# Altium footprint library BaseStation.PcbLib: 68 footprints (part 2 of 5)
Each footprint in its own frame and in the unit in brackets; x right, y up, seen from the top. Pads: shape width x height; smd on the part's side, far side on the other; paste and mask are expansions set on the pad; w line width, h text height; cw(c..) or ccw(c..) is an arc to the next point about the centre after c.
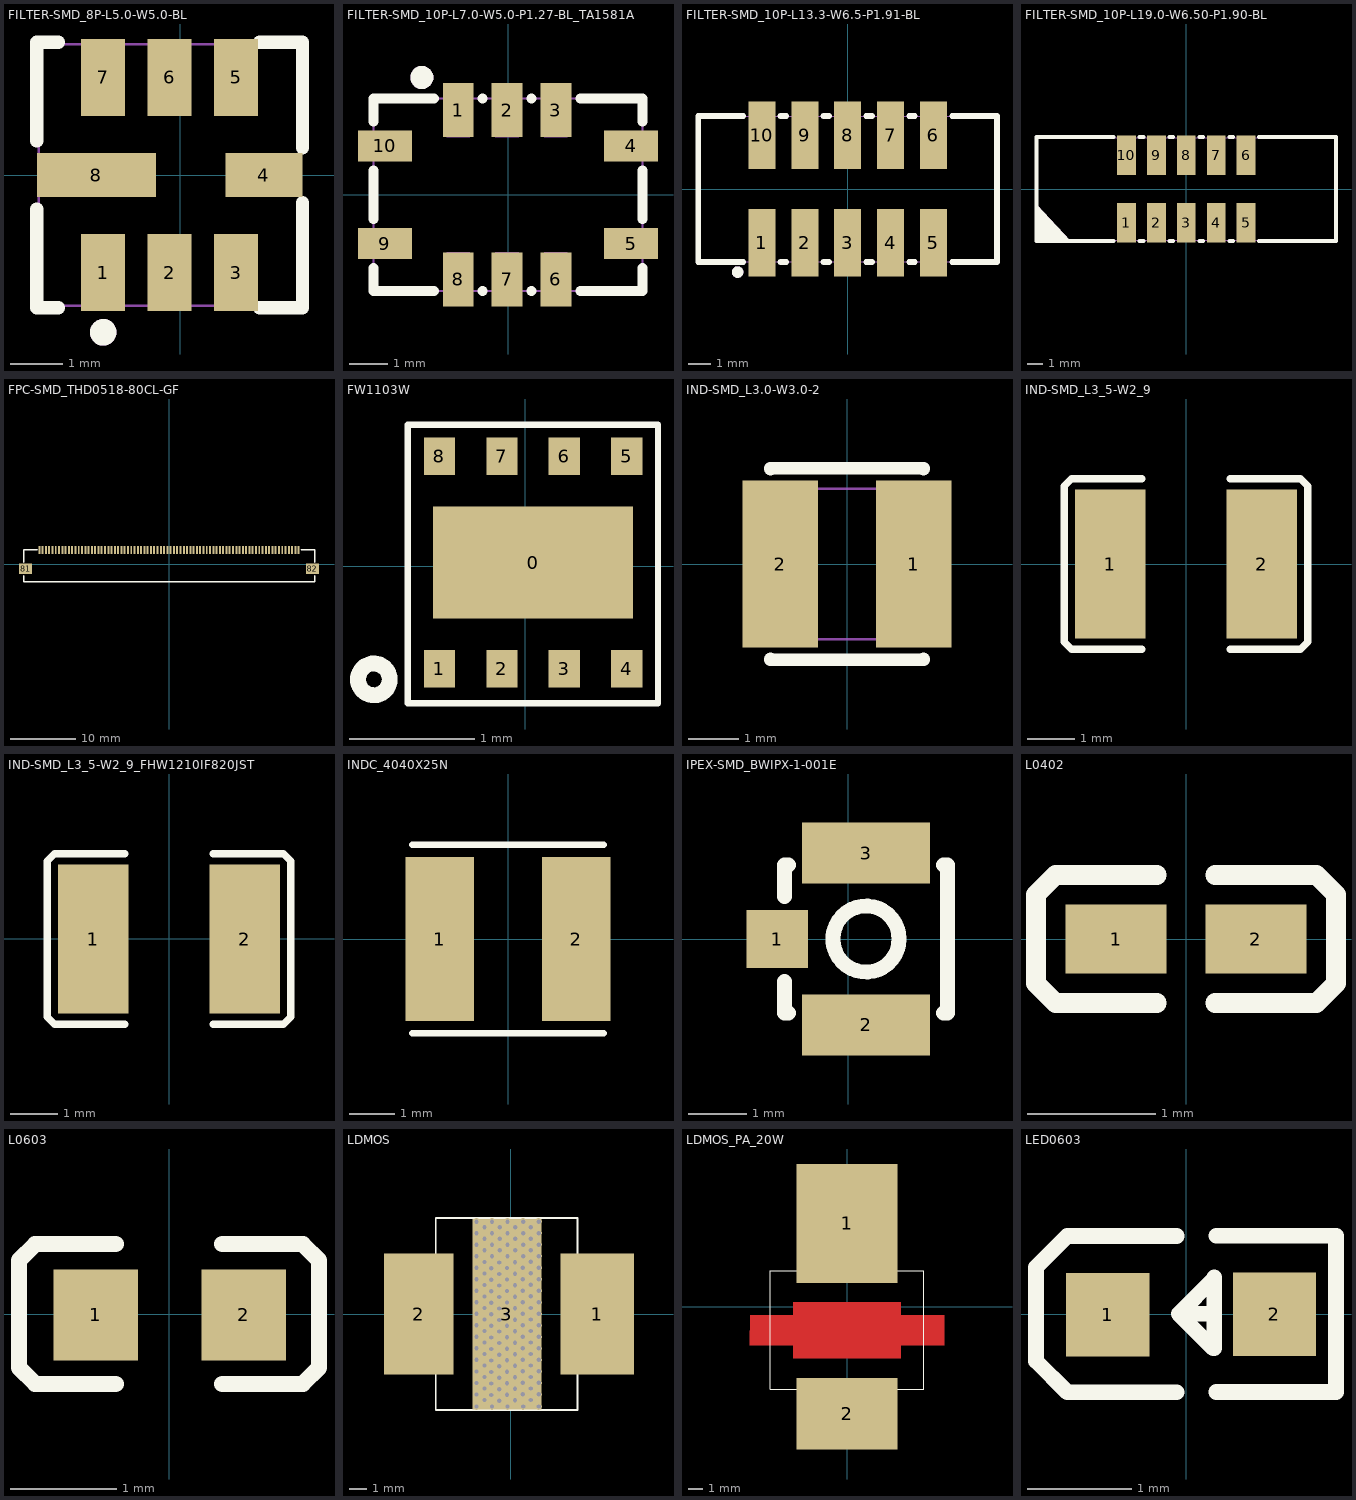
[diagram p1: the footprints below, top view; thin cyan lines are the x and y axes]

## FILTER-SMD_8P-L5.0-W5.0-BL [mm]
pads (8):
  rect 0.84x1.47 smd: 1(-1.47,-1.865) 2(-0.2,-1.865) 3(1.07,-1.865) 5(1.07,1.865) 6(-0.2,1.865) 7(-1.47,1.865)
  rect 1.47x0.84 smd: 4(1.6,0)
  rect 2.28x0.84 smd: 8(-1.6,0)
Top Overlay:
  circle w0.254: c-1.47,-3.008 r0.127
  lines w0.254: -2.743,-0.651 -2.743,-2.54 -2.324,-2.54 ; -2.743,0.651 -2.743,2.54 -2.324,2.54 ; 1.519,-2.54 2.337,-2.54 2.337,-0.524 ; 1.519,2.54 2.337,2.54 2.337,0.524
Mechanical 2:
  circle w0.254: c-1.47,-3.008 r0.127
Mechanical 6:
  lines w0.051: -2.703,-2.5 2.297,-2.5 2.297,2.5 -2.703,2.5 -2.703,-2.5
Mechanical 8:
  region: -2.643,-2.525 -2.678,-2.56 -2.727,-2.56 -2.763,-2.525 -2.763,-2.475 -2.727,-2.44 -2.678,-2.44 -2.643,-2.475
Mechanical 9:
  region: -2.703,0.32 -0.623,0.32 -0.623,-0.32 -2.703,-0.32
  region: -1.79,-1.33 -1.15,-1.33 -1.15,-2.5 -1.79,-2.5
  region: -0.52,-1.33 0.12,-1.33 0.12,-2.5 -0.52,-2.5
  region: 0.75,-1.33 1.39,-1.33 1.39,-2.5 0.75,-2.5
  region: 1.127,0.32 2.297,0.32 2.297,-0.32 1.127,-0.32
  region: 0.75,2.5 1.39,2.5 1.39,1.33 0.75,1.33
  region: -0.52,2.5 0.12,2.5 0.12,1.33 -0.52,1.33
  region: -1.79,2.5 -1.15,2.5 -1.15,1.33 -1.79,1.33

## FILTER-SMD_10P-L7.0-W5.0-P1.27-BL_TA1581A [mm]
pads (10):
  rect 0.8x1.4 smd paste+0 mask+0.05: 1(-1.295,2.2) 2(-0.025,2.2) 3(1.245,2.2) 6(1.245,-2.2) 7(-0.025,-2.2) 8(-1.295,-2.2)
  rect 1.4x0.8 smd paste+0 mask+0.05: 4(3.2,1.27) 5(3.2,-1.27) 9(-3.2,-1.27) 10(-3.2,1.27)
Top Overlay:
  circle w0.3: c-2.24,3.05 r0.15
  lines w0.254: -3.5,-1.901 -3.5,-2.5 -1.926,-2.5 ; -3.5,-0.639 -3.5,0.639 ; -3.5,1.901 -3.5,2.5 -1.926,2.5 ; -0.664,-2.5 -0.656,-2.5 ; -0.664,2.5 -0.656,2.5 ; 0.606,-2.5 0.614,-2.5 ; 0.606,2.5 0.614,2.5 ; 1.876,-2.5 3.5,-2.5 3.5,-1.901 ; 1.876,2.5 3.5,2.5 3.5,1.901 ; 3.5,-0.639 3.5,0.639
Mechanical 2:
  circle w0.3: c-2.24,3.05 r0.15
Mechanical 6:
  lines w0.051: -3.5,-2.5 -3.5,2.5 3.5,2.5 3.5,-2.5 -3.5,-2.5
Mechanical 8:
  region: -3.44,2.475 -3.475,2.44 -3.525,2.44 -3.56,2.475 -3.56,2.525 -3.525,2.56 -3.475,2.56 -3.44,2.525
Mechanical 9:
  region: -3.5,1.57 -2.5,1.57 -2.5,0.97 -3.5,0.97
  region: -3.5,-0.97 -2.5,-0.97 -2.5,-1.57 -3.5,-1.57
  region: -1.595,-2.5 -1.595,-1.5 -0.995,-1.5 -0.995,-2.5
  region: -0.325,-2.5 -0.325,-1.5 0.275,-1.5 0.275,-2.5
  region: 0.945,-2.5 0.945,-1.5 1.545,-1.5 1.545,-2.5
  region: 3.5,-1.57 2.5,-1.57 2.5,-0.97 3.5,-0.97
  region: 3.5,0.97 2.5,0.97 2.5,1.57 3.5,1.57
  region: 1.545,2.5 1.545,1.5 0.945,1.5 0.945,2.5
  region: 0.275,2.5 0.275,1.5 -0.325,1.5 -0.325,2.5
  region: -0.995,2.5 -0.995,1.5 -1.595,1.5 -1.595,2.5

## FILTER-SMD_10P-L13.3-W6.5-P1.91-BL [mm]
pads (10):
  rect 1.2x3 smd paste+0 mask+0.05: 1(-3.82,-2.4) 2(-1.91,-2.4) 3(0,-2.4) 4(1.91,-2.4) 5(3.82,-2.4) 6(3.82,2.4) 7(1.91,2.4) 8(0,2.4) 9(-1.91,2.4) 10(-3.82,2.4)
Top Overlay:
  circle w0.254: c-4.9,-3.7 r0.127
  lines w0.254: -4.651,-3.25 -6.65,-3.25 -6.65,3.25 -4.651,3.25 ; -2.989,-3.25 -2.741,-3.25 ; -2.989,3.25 -2.741,3.25 ; -1.079,-3.25 -0.831,-3.25 ; -1.079,3.25 -0.831,3.25 ; 0.831,-3.25 1.079,-3.25 ; 0.831,3.25 1.079,3.25 ; 2.741,-3.25 2.989,-3.25 ; 2.741,3.25 2.989,3.25 ; 4.651,-3.25 6.65,-3.25 6.65,3.25 4.651,3.25
Mechanical 2:
  circle w0.254: c-4.9,-3.7 r0.127
Mechanical 6:
  lines w0.051: -6.65,-3.25 6.65,-3.25 6.65,3.25 -6.65,3.25 -6.65,-3.25
Mechanical 8:
  region: -6.59,-3.275 -6.625,-3.31 -6.675,-3.31 -6.71,-3.275 -6.71,-3.225 -6.675,-3.19 -6.625,-3.19 -6.59,-3.225
Mechanical 9:
  region: -4.33,-1.02 -3.31,-1.02 -3.31,-3.25 -4.33,-3.25
  region: -2.42,-1.02 -1.4,-1.02 -1.4,-3.25 -2.42,-3.25
  region: -0.51,-1.02 0.51,-1.02 0.51,-3.25 -0.51,-3.25
  region: 1.4,-1.02 2.42,-1.02 2.42,-3.25 1.4,-3.25
  region: 3.31,-1.02 4.33,-1.02 4.33,-3.25 3.31,-3.25
  region: 3.31,3.25 4.33,3.25 4.33,1.02 3.31,1.02
  region: 1.4,3.25 2.42,3.25 2.42,1.02 1.4,1.02
  region: -0.51,3.25 0.51,3.25 0.51,1.02 -0.51,1.02
  region: -2.42,3.25 -1.4,3.25 -1.4,1.02 -2.42,1.02
  region: -4.33,3.25 -3.31,3.25 -3.31,1.02 -4.33,1.02

## FILTER-SMD_10P-L19.0-W6.50-P1.90-BL [mm]
pads (10):
  rect 1.2x2.5 smd paste+0 mask+0.05: 1(-3.81,-2.15) 2(-1.905,-2.15) 3(0,-2.15) 4(1.905,-2.15) 5(3.81,-2.15) 6(3.81,2.15) 7(1.905,2.15) 8(0,2.15) 9(-1.905,2.15) 10(-3.81,2.15)
Top Overlay:
  region: -9.525,-1.016 -9.525,-3.302 -7.366,-3.302
  lines w0.254: -4.641,-3.302 -9.525,-3.302 -9.525,3.302 -4.641,3.302 ; -2.979,-3.302 -2.736,-3.302 ; -2.979,3.302 -2.736,3.302 ; -1.074,-3.302 -0.831,-3.302 ; -1.074,3.302 -0.831,3.302 ; 0.831,-3.302 1.074,-3.302 ; 0.831,3.302 1.074,3.302 ; 2.736,-3.302 2.979,-3.302 ; 2.736,3.302 2.979,3.302 ; 4.641,-3.302 9.525,-3.302 9.525,3.302 4.641,3.302 4.699,3.302
Mechanical 2:
  region: -9.525,-1.016 -9.525,-3.302 -7.366,-3.302
Mechanical 6:
  lines w0.051: -9.5,-3.25 9.5,-3.25 9.5,3.25 -9.5,3.25 -9.5,-3.25
Mechanical 8:
  region: -9.44,-3.275 -9.475,-3.31 -9.525,-3.31 -9.56,-3.275 -9.56,-3.225 -9.525,-3.19 -9.475,-3.19 -9.44,-3.225
Mechanical 9:
  region: -4.32,-0.964 -3.3,-0.964 -3.3,-3.25 -4.32,-3.25
  region: -2.415,-0.964 -1.395,-0.964 -1.395,-3.25 -2.415,-3.25
  region: -0.51,-0.964 0.51,-0.964 0.51,-3.25 -0.51,-3.25
  region: 1.395,-0.964 2.415,-0.964 2.415,-3.25 1.395,-3.25
  region: 3.3,-0.964 4.32,-0.964 4.32,-3.25 3.3,-3.25
  region: 3.3,3.25 4.32,3.25 4.32,0.964 3.3,0.964
  region: 1.395,3.25 2.415,3.25 2.415,0.964 1.395,0.964
  region: -0.51,3.25 0.51,3.25 0.51,0.964 -0.51,0.964
  region: -2.415,3.25 -1.395,3.25 -1.395,0.964 -2.415,0.964
  region: -4.32,3.25 -3.3,3.25 -3.3,0.964 -4.32,0.964

## FPC-SMD_THD0518-80CL-GF [mm] "FPC-SMD_THD0518-80CL-GF"
pads (82):
  rect 0.3x1.2 smd: 1(-19.75,2.143) 2(-19.251,2.143) 3(-18.751,2.143) 4(-18.25,2.143) 5(-17.75,2.143) 6(-17.249,2.143) 7(-16.749,2.143) 8(-16.25,2.143) 9(-15.751,2.143) 10(-15.25,2.143) 11(-14.75,2.143) 12(-14.25,2.143) 13(-13.749,2.143) 14(-13.25,2.143) 15(-12.75,2.143) 16(-12.251,2.143) 17(-11.75,2.143) 18(-11.25,2.143) 19(-10.75,2.143) 20(-10.249,2.143) 21(-9.749,2.143) 22(-9.251,2.143) 23(-8.751,2.143) 24(-8.25,2.143) 25(-7.75,2.143) 26(-7.249,2.143) 27(-6.749,2.143) 28(-6.25,2.143) 29(-5.751,2.143) 30(-5.25,2.143) 31(-4.75,2.143) 32(-4.25,2.143) 33(-3.749,2.143) 34(-3.249,2.143) 35(-2.749,2.143) 36(-2.251,2.143) 37(-1.75,2.143) 38(-1.25,2.143) 39(-0.75,2.143) 40(-0.249,2.143) 41(0.251,2.143) 42(0.749,2.143) 43(1.249,2.143) 44(1.75,2.143) 45(2.25,2.143) 46(2.751,2.143) 47(3.251,2.143) 48(3.75,2.143) 49(4.249,2.143) 50(4.75,2.143) 51(5.25,2.143) 52(5.75,2.143) 53(6.251,2.143) 54(6.751,2.143) 55(7.25,2.143) 56(7.749,2.143) 57(8.25,2.143) 58(8.75,2.143) 59(9.25,2.143) 60(9.751,2.143) 61(10.25,2.143) 62(10.75,2.143) 63(11.25,2.143) 64(11.75,2.143) 65(12.25,2.143) 66(12.75,2.143) 67(13.25,2.143) 68(13.75,2.143) 69(14.25,2.143) 70(14.75,2.143) 71(15.25,2.143) 72(15.75,2.143) 73(16.25,2.143) 74(16.75,2.143) 75(17.25,2.143) 76(17.75,2.143) 77(18.25,2.143) 78(18.75,2.143) 79(19.25,2.143) 80(19.75,2.143)
  rect 2x1.6 smd: 81(-21.85,-0.697) 82(21.85,-0.697)
Top Overlay:
  lines w0.254: -22.15,-1.728 -22.15,-2.667 22.19,-2.667 22.19,-1.728 ; -22.15,0.334 -22.15,2.223 -20.11,2.223 ; 20.131,2.223 22.19,2.223 22.19,2.173 22.19,0.334

## FW1103W [mm] "FW1103W"
pads (9):
  rect 1.6x0.9 smd: 0(0.065,0.03)
  rect 0.25x0.3 smd: 1(-0.685,-0.82) 2(-0.185,-0.82) 3(0.315,-0.82) 4(0.815,-0.82) 5(0.815,0.88) 6(0.315,0.881) 7(-0.185,0.88) 8(-0.685,0.88)
Top Overlay:
  circle w0.127: c-1.211,-0.905 r0.127
  lines w0.05: -0.94,0.998 -0.939,0.999 -0.939,1.134 1.065,1.134 1.065,-1.091 ; -0.938,0.986 -0.938,-1.097 -0.435,-1.097 0.565,-1.097 1.065,-1.097

## IND-SMD_L3.0-W3.0-2 [mm]
pads (2):
  rect 1.5x3.32 smd: 1(1.328,0) 2(-1.328,0)
Top Overlay:
  lines w0.254: -1.524,-1.891 -1.524,-1.905 1.524,-1.905 1.524,-1.891 ; -1.524,1.891 -1.524,1.905 1.524,1.905 1.524,1.891
Mechanical 15:
  region: 1.584,-1.524 1.584,-1.549 1.549,-1.584 1.499,-1.584 1.464,-1.549 1.464,-1.524 1.464,-1.499 1.499,-1.464 1.549,-1.464 1.584,-1.499
  region: -1.5,-1.45 -1.5,1.45 -0.75,1.45 -0.75,-1.45
  region: 1.5,-1.45 1.5,1.45 0.75,1.45 0.75,-1.45
  lines w0.051: -1.5,-1.5 -1.5,1.5 1.5,1.5 1.5,-1.5 -1.5,-1.5

## IND-SMD_L3_5-W2_9 [mm] "IND-SMD_L3_5-W2_9"
pads (2):
  rect 1.485x3.132 smd: 1(-1.593,0) 2(1.593,0)
Top Overlay:
  lines w0.152: -0.926,-1.795 -2.411,-1.795 -2.564,-1.642 -2.564,1.642 -2.411,1.795 -0.926,1.795 ; 0.926,-1.795 2.411,-1.795 2.564,-1.642 2.564,1.642 2.411,1.795 0.926,1.795

## IND-SMD_L3_5-W2_9_FHW1210IF820JST [mm] "IND-SMD_L3_5-W2_9_FHW1210IF820JST"
pads (2):
  rect 1.485x3.132 smd: 1(-1.593,0) 2(1.593,0)
Top Overlay:
  lines w0.152: -0.926,-1.795 -2.411,-1.795 -2.564,-1.642 -2.564,1.642 -2.411,1.795 -0.926,1.795 ; 0.926,-1.795 2.411,-1.795 2.564,-1.642 2.564,1.642 2.411,1.795 0.926,1.795

## INDC_4040X25N [mm] "INDC_4040X25N"
pads (2):
  rect 1.5x3.6 smd: 1(-1.5,0) 2(1.5,0)
Top Overlay:
  lines w0.15: -2.1,-2.075 2.1,-2.075 ; -2.1,2.075 2.1,2.075

## IPEX-SMD_BWIPX-1-001E [mm] "IPEX-SMD_BWIPX-1-001E"
pads (3):
  rect 1.05x1 smd: 1(-1.224,0)
  rect 2.2x1.05 smd: 2(0.301,-1.475) 3(0.301,1.475)
Top Overlay:
  circle w0.254: c0.301,0 r0.568
  lines w0.254: -1.097,-0.731 -1.097,-1.27 -1.031,-1.27 ; -1.097,0.731 -1.097,1.27 -1.031,1.27 ; 1.632,-1.27 1.698,-1.27 1.698,-0.731 1.698,0.731 1.698,1.27 1.632,1.27

## L0402 [mm] "L0402"
pads (2):
  rect 0.79x0.54 smd: 1(-0.545,0) 2(0.545,0)
Top Overlay:
  lines w0.152: -0.226,-0.499 -1.016,-0.499 -1.169,-0.346 -1.169,0.346 -1.016,0.499 -0.226,0.499 ; 0.226,-0.499 1.016,-0.499 1.169,-0.346 1.169,0.346 1.016,0.499 0.226,0.499

## L0603 [mil] "L0603"
pads (2):
  rect 31.5x34.02 smd: 1(-27.29,-0.36) 2(27.82,-0.36)
Top Overlay:
  lines w5.98: -49.8,-26 -19.8,-26 ; -49.8,26.01 -19.8,26.01 ; 19.8,-26 49.8,-26 ; 19.8,26.01 49.8,26.01
  lines w6: -49.8,-26 -55.8,-20.01 -55.8,20.01 -49.8,26.01 ; 49.8,-26 55.8,-20.01 55.8,20.01 49.8,26.01

## LDMOS [mm]
pads (3):
  rect 4.25x7 smd mask+0: 1(4.994,0.007)
  rect 4x7 smd mask+0: 2(-5.328,0.007)
  rect 4x11 smd mask+0: 3(-0.228,0.007)
via 1.601,4.679 diameter 0.4 hole 0.25
via 1.601,4.014 diameter 0.4 hole 0.25
via 1.601,2.682 diameter 0.4 hole 0.25
via 1.601,2.017 diameter 0.4 hole 0.25
via 1.601,1.353 diameter 0.4 hole 0.25
via 1.601,0.688 diameter 0.4 hole 0.25
via 1.601,0.024 diameter 0.4 hole 0.25
via 1.601,-0.641 diameter 0.4 hole 0.25
via 1.601,-1.305 diameter 0.4 hole 0.25
via 1.601,-1.97 diameter 0.4 hole 0.25
via 1.601,-2.634 diameter 0.4 hole 0.25
via 1.601,-3.299 diameter 0.4 hole 0.25
via 1.601,-3.963 diameter 0.4 hole 0.25
via 1.601,-4.628 diameter 0.4 hole 0.25
via 1.138,3.021 diameter 0.4 hole 0.25
via 1.138,2.357 diameter 0.4 hole 0.25
via 1.138,1.692 diameter 0.4 hole 0.25
via 1.138,1.028 diameter 0.4 hole 0.25
via 1.138,0.363 diameter 0.4 hole 0.25
via 1.138,-0.301 diameter 0.4 hole 0.25
via 1.138,-0.966 diameter 0.4 hole 0.25
via 1.138,-1.63 diameter 0.4 hole 0.25
via 1.138,-2.295 diameter 0.4 hole 0.25
via 1.138,-2.959 diameter 0.4 hole 0.25
via 1.138,-3.624 diameter 0.4 hole 0.25
via 1.138,-4.288 diameter 0.4 hole 0.25
via 1.138,-4.953 diameter 0.4 hole 0.25
via 0.705,4.679 diameter 0.4 hole 0.25
via 0.705,4.014 diameter 0.4 hole 0.25
via 0.705,3.35 diameter 0.4 hole 0.25
via 0.676,2.685 diameter 0.4 hole 0.25
via 0.676,2.02 diameter 0.4 hole 0.25
via 0.676,1.355 diameter 0.4 hole 0.25
via 0.676,0.691 diameter 0.4 hole 0.25
via 0.676,0.026 diameter 0.4 hole 0.25
via 0.676,-0.639 diameter 0.4 hole 0.25
via 0.676,-1.304 diameter 0.4 hole 0.25
via 0.676,-1.968 diameter 0.4 hole 0.25
via 0.676,-2.633 diameter 0.4 hole 0.25
via 0.676,-3.298 diameter 0.4 hole 0.25
via 0.676,-3.963 diameter 0.4 hole 0.25
via 0.676,-4.628 diameter 0.4 hole 0.25
via 0.705,5.344 diameter 0.4 hole 0.25
via 1.601,5.344 diameter 0.4 hole 0.25
via 0.233,3.003 diameter 0.4 hole 0.25
via 0.233,2.338 diameter 0.4 hole 0.25
via 0.233,1.674 diameter 0.4 hole 0.25
via 0.233,1.009 diameter 0.4 hole 0.25
via 0.233,0.345 diameter 0.4 hole 0.25
via 0.233,-0.32 diameter 0.4 hole 0.25
via 0.233,-0.984 diameter 0.4 hole 0.25
via 0.233,-1.649 diameter 0.4 hole 0.25
via 0.233,-2.313 diameter 0.4 hole 0.25
via 0.233,-2.978 diameter 0.4 hole 0.25
via 0.233,-3.642 diameter 0.4 hole 0.25
via 0.233,-4.307 diameter 0.4 hole 0.25
via 0.233,-4.971 diameter 0.4 hole 0.25
via -0.192,4.679 diameter 0.4 hole 0.25
via -0.192,4.014 diameter 0.4 hole 0.25
via -0.228,2.666 diameter 0.4 hole 0.25
via -0.228,2.001 diameter 0.4 hole 0.25
via -0.228,1.336 diameter 0.4 hole 0.25
via -0.228,0.672 diameter 0.4 hole 0.25
via -0.228,0.007 diameter 0.4 hole 0.25
via -0.228,-0.658 diameter 0.4 hole 0.25
via -0.228,-1.323 diameter 0.4 hole 0.25
via -0.228,-1.987 diameter 0.4 hole 0.25
via -0.228,-2.652 diameter 0.4 hole 0.25
via -0.228,-3.317 diameter 0.4 hole 0.25
via -0.228,-3.982 diameter 0.4 hole 0.25
via -0.228,-4.646 diameter 0.4 hole 0.25
via -0.192,5.344 diameter 0.4 hole 0.25
via -0.636,4.35 diameter 0.4 hole 0.25
via -0.674,2.985 diameter 0.4 hole 0.25
via -0.674,2.32 diameter 0.4 hole 0.25
via -0.674,1.656 diameter 0.4 hole 0.25
via -0.674,0.991 diameter 0.4 hole 0.25
via -0.674,0.327 diameter 0.4 hole 0.25
via -0.674,-0.338 diameter 0.4 hole 0.25
via -0.674,-1.002 diameter 0.4 hole 0.25
via -0.674,-1.667 diameter 0.4 hole 0.25
via -0.674,-2.331 diameter 0.4 hole 0.25
via -0.674,-2.996 diameter 0.4 hole 0.25
via -0.674,-3.66 diameter 0.4 hole 0.25
via -0.674,-4.325 diameter 0.4 hole 0.25
via -0.674,-4.989 diameter 0.4 hole 0.25
via -1.088,4.679 diameter 0.4 hole 0.25
via -1.088,4.014 diameter 0.4 hole 0.25
via -1.136,2.648 diameter 0.4 hole 0.25
via -1.136,1.983 diameter 0.4 hole 0.25
via -1.136,1.319 diameter 0.4 hole 0.25
via -1.136,0.654 diameter 0.4 hole 0.25
via -1.136,-0.011 diameter 0.4 hole 0.25
via -1.136,-0.676 diameter 0.4 hole 0.25
via -1.136,-1.34 diameter 0.4 hole 0.25
via -1.136,-2.005 diameter 0.4 hole 0.25
via -1.136,-2.67 diameter 0.4 hole 0.25
via -1.136,-3.335 diameter 0.4 hole 0.25
via -1.136,-4 diameter 0.4 hole 0.25
via -1.136,-4.664 diameter 0.4 hole 0.25
via -1.088,5.344 diameter 0.4 hole 0.25
via -1.523,3.016 diameter 0.4 hole 0.25
via -1.523,2.351 diameter 0.4 hole 0.25
via -1.523,1.687 diameter 0.4 hole 0.25
via -1.523,1.022 diameter 0.4 hole 0.25
via -1.523,0.358 diameter 0.4 hole 0.25
via -1.523,-0.307 diameter 0.4 hole 0.25
via -1.523,-0.971 diameter 0.4 hole 0.25
via -1.523,-1.636 diameter 0.4 hole 0.25
via -1.523,-2.3 diameter 0.4 hole 0.25
via -1.523,-2.965 diameter 0.4 hole 0.25
via -1.523,-3.629 diameter 0.4 hole 0.25
via -1.523,-4.294 diameter 0.4 hole 0.25
via -1.523,-4.958 diameter 0.4 hole 0.25
via -1.985,4.679 diameter 0.4 hole 0.25
via -1.985,4.014 diameter 0.4 hole 0.25
via -1.985,2.679 diameter 0.4 hole 0.25
via -1.985,2.015 diameter 0.4 hole 0.25
via -1.985,1.35 diameter 0.4 hole 0.25
via -1.985,0.685 diameter 0.4 hole 0.25
via -1.985,0.02 diameter 0.4 hole 0.25
via -1.985,-0.645 diameter 0.4 hole 0.25
via -1.985,-1.309 diameter 0.4 hole 0.25
via -1.985,-1.974 diameter 0.4 hole 0.25
via -1.985,-2.639 diameter 0.4 hole 0.25
via -1.985,-3.304 diameter 0.4 hole 0.25
via -1.985,-3.968 diameter 0.4 hole 0.25
via -1.985,-4.633 diameter 0.4 hole 0.25
via -1.985,5.344 diameter 0.4 hole 0.25
via -0.636,5.015 diameter 0.4 hole 0.25
via 0.251,5.015 diameter 0.4 hole 0.25
via -1.523,5.015 diameter 0.4 hole 0.25
via 1.138,5.015 diameter 0.4 hole 0.25
via 1.138,4.35 diameter 0.4 hole 0.25
via -1.523,4.35 diameter 0.4 hole 0.25
via 0.251,4.35 diameter 0.4 hole 0.25
via 0.251,3.686 diameter 0.4 hole 0.25
via -0.636,3.686 diameter 0.4 hole 0.25
via -1.523,3.686 diameter 0.4 hole 0.25
via 1.138,3.686 diameter 0.4 hole 0.25
via -1.088,-5.329 diameter 0.4 hole 0.25
via 0.705,-5.329 diameter 0.4 hole 0.25
via -0.192,-5.329 diameter 0.4 hole 0.25
via -1.985,-5.329 diameter 0.4 hole 0.25
via -1.088,3.35 diameter 0.4 hole 0.25
via -0.192,3.35 diameter 0.4 hole 0.25
via -1.985,3.35 diameter 0.4 hole 0.25
via 1.601,3.35 diameter 0.4 hole 0.25
via 1.601,-5.329 diameter 0.4 hole 0.25
Top Overlay:
  lines w0.1: -4.334,5.543 -4.334,-5.527 -2.042,-5.527 ; -4.334,5.552 3.847,5.552 ; 3.847,5.543 3.847,-5.527 1.236,-5.527 -2.042,-5.527 ; -2.042,-5.527 -2.042,-5.527
Top Solder:
  lines w0.01: -2.306,3.748 -2.304,-3.726 -1.395,-3.724 ; 0.699,-3.73 1.599,-3.729 1.598,3.742 0.698,3.747

## LDMOS_PA_20W [mm] "LDMOS_PA_20W"
pads (4):
  rect 7x8.25 smd: 1(-0.001,5.78)
  rect 7x4.97 smd: 2(-0.001,-7.42)
  round 0.025 smd: 3(-6.751,-2.67) 3(0.005,-1.628)
Top Layer:
  region: -6.751,-2.67 -3.733,-2.67 -3.733,-3.578 3.737,-3.578 3.737,-2.669 6.76,-2.669 6.76,-0.579 3.737,-0.579 3.737,0.321 -3.733,0.321 -3.733,-0.579 -6.733,-0.579
Top Overlay:
  lines w0.01: -5.335,-5.72 -5.335,2.48 ; -5.326,-5.72 5.324,-5.72 ; -5.326,2.48 5.324,2.48 ; 5.333,-5.72 5.333,2.48
Top Solder:
  lines w0.01: -6.75,-2.67 -6.75,-0.571 -3.741,-0.567 -3.736,0.333 3.735,0.334 3.736,-0.566 6.749,-0.57 6.75,-2.666 3.73,-2.66 3.732,-3.569 -3.742,-3.571 -3.732,-2.664 -6.75,-2.67

## LED0603 [mil] "LED0603"
pads (2):
  rect 31.5x31.5 smd: 1(-29.53,-0.35) 2(33.43,-0.07)
Top Overlay:
  lines w5.91: -3.53,-29.57 -44.88,-29.57 -56.7,-17.77 -56.7,-13.83 -56.7,13.72 -56.7,17.67 -44.88,29.48 -3.53,29.48 ; 10.63,0.04 -2.75,0.04 ; 11.43,-29.48 56.69,-29.48 ; 11.43,29.57 56.69,29.57 ; 56.69,-28.7 56.69,29.56 ; -2.75,0.04 10.24,-12.96 10.63,-12.96 10.63,13.82 10.63,13.43 -2.75,0.04